# Altium schematic symbol library TitansLib.SchLib: 462 symbols (part 20 of 24)
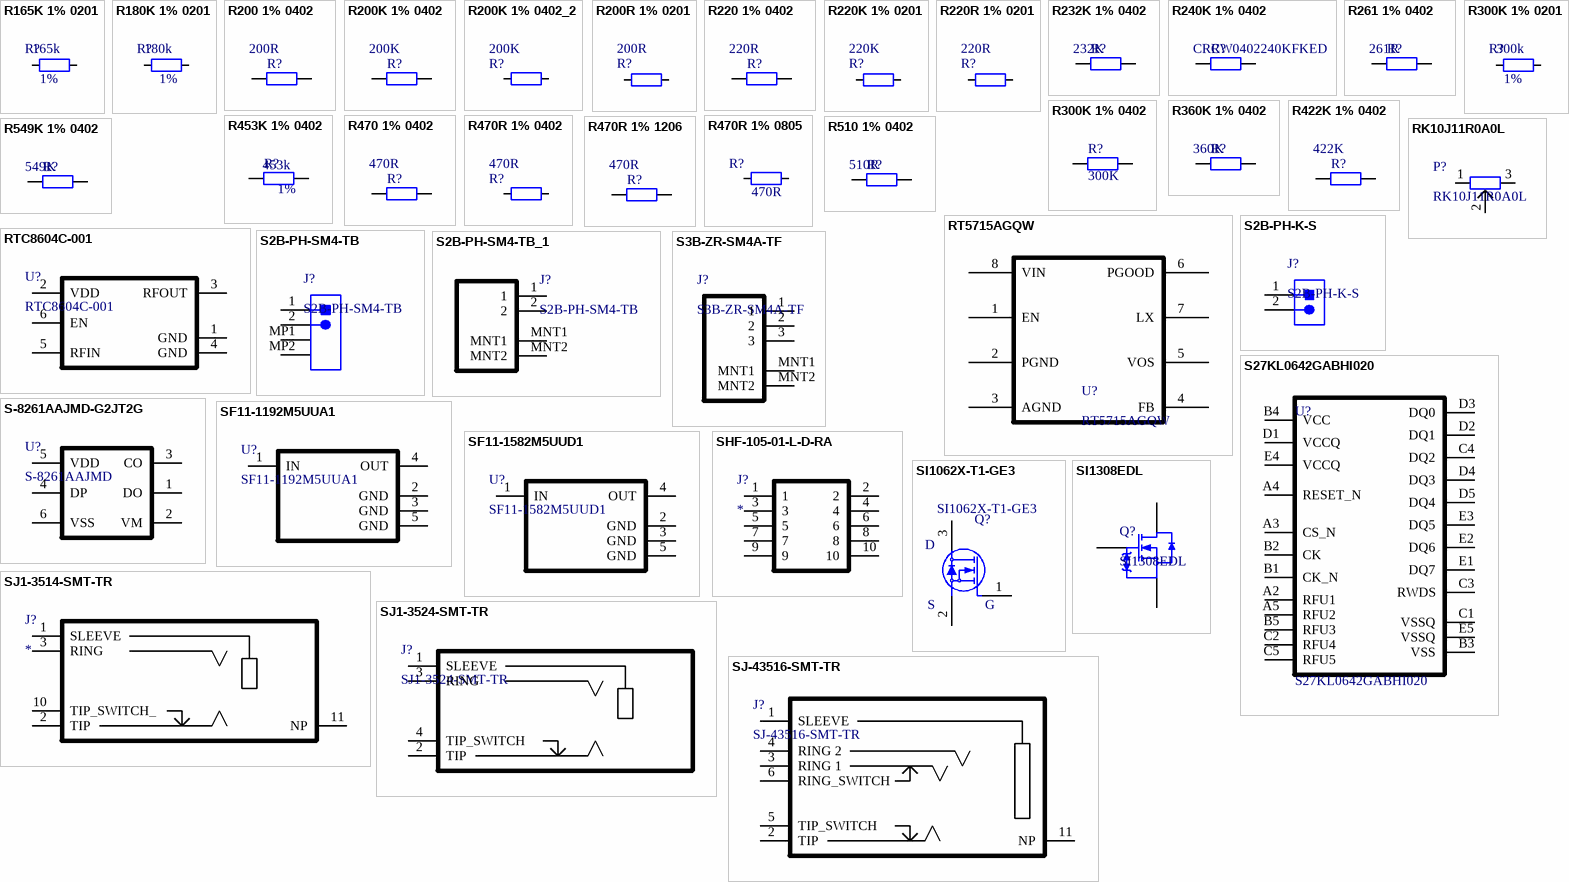
[diagram p36: symbols R165K 1% 0201 to SJ-43516-SMT-TR]

## R470 1% 0402
designator R?, comment 470R
470R 1% 0402 1/16W; Manufacturer: Yageo; Manufacturer Part Number: RC0402FR-07470RL; Additional Feature: LASER TRIMMABLE; Power: 62.5mW; Rated Temperature: 70°C; Working Voltage: 50V; Temperature Coefficient (ppm/Cel): 100; Package Height: 0.35mm; Package Length: 1mm; Package Width: 0.5mm; Supplier: Digikey; Supplier Part Number: 311-470LRCT-ND; RoHS: Yes; Category: Chip SMD Resistors; Stock: 1075453; Pricing: 1=0.1, 10=0.008, 25=0.004, 50=0.003 (USD); Mounting Technology: Surface Mount; Pins: 2; Package Shape: Rectangular; Case/Package: 0402; Terminal Finish: Nickel; Min Operating Temperature: -55°C; Max Operating Temperature: 155°C; Tolerance: 1%; JESD-609 Code: e3; Resistor Type: FIXED RESISTOR; Construction: Chip; Packaging: Tape and Reel; Technology: METAL GLAZE/THICK FILM; Termination: Wraparound; Reach SVHC Compliant: Yes; RoHS Compliant: Yes; ComponentLink1URL: https://datasheet.ciiva.com:443/pdfs/VipMasterIC/IC/YAGO/YAGO-S-A0008145938/YAGO-S-A0008145938-1.pdf?src-supplier=IHS+Markit; ComponentLink1Description: https://datasheet.ciiva.com:443/pdfs/VipMasterIC/IC/YAGO/YAGO-S-A0008145938/YAGO-S-A0008145938-1.pdf?src-supplier=IHS+Markit; ComponentLink2URL: https://datasheet.ciiva.com/2453/pyu-r-int-thick-7-2453376.pdf?src-supplier=Digikey; ComponentLink2Description: https://datasheet.ciiva.com/2453/pyu-r-int-thick-7-2453376.pdf?src-supplier=Digikey; ComponentLink3URL: https://datasheet.ciiva.com/2453/pyu-r-int-thick-7-2453377.pdf?src-supplier=Digikey; ComponentLink3Description: https://datasheet.ciiva.com/2453/pyu-r-int-thick-7-2453377.pdf?src-supplier=Digikey; ComponentLink4URL: https://datasheet.ciiva.com/2453/pyu-r-int-thick-7-2453378.pdf?src-supplier=Digikey; ComponentLink4Description: https://datasheet.ciiva.com/2453/pyu-r-int-thick-7-2453378.pdf?src-supplier=Digikey; ComponentLink5URL: https://datasheet.ciiva.com/15189/getdatasheetpartid-330246-15189463.pdf?src-supplier=Verical; ComponentLink5Description: https://datasheet.ciiva.com/15189/getdatasheetpartid-330246-15189463.pdf?src-supplier=Verical; ComponentLink6URL: https://datasheet.ciiva.com/7850/1018594-7850014.pdf?src-supplier=Element14; ComponentLink6Description: https://datasheet.ciiva.com/7850/1018594-7850014.pdf?src-supplier=Element14; ComponentLink7URL: https://datasheet.ciiva.com/7850/1018594-7850015.pdf?src-supplier=Element14; ComponentLink7Description: https://datasheet.ciiva.com/7850/1018594-7850015.pdf?src-supplier=Element14; ComponentLink8URL: https://datasheet.ciiva.com/46412/1018594-46412838.pdf?src-supplier=Element14; ComponentLink8Description: https://datasheet.ciiva.com/46412/1018594-46412838.pdf?src-supplier=Element14; Value: 470R
footprint R0402_H0P4
pins: 1, 2

## R470R 1% 0402
designator R?, comment value 470R  (hidden comment: RC0402FR-07470RL)
Res Thick Film 0402 470 Ohm 1% 0.063W(1/16W) ±100ppm/C Pad SMD T/R; Manufacturer: Yageo Group; Max Power Dissipation: 63mW; Power Dissipation: 62.5mW; Temperature Coefficient: 100ppm/°C; Voltage Rating: 50V; Supplier: DigiKey; Supplier Part Number: 311-470LRCT-ND; Manufacturer Part Number: RC0402FR-07470RL; RoHS: Compliant; Category: Chip SMD Resistors; Stock: 167633; Pricing: 1=0.1, 10=0.003 (USD); Case/Package: 0402; Case Code (Imperial): 0402; China RoHS: Non-Compliant; Composition: Thick Film; Depth: 500µm; Features: Moisture Resistant; Height: 350µm; Lead Free: Lead Free; Length: 1mm; Lifecycle Status: Production; Max Operating Temperature: 155°C; Military Standard: Not; Min Operating Temperature: -55°C; Mounting Technology: Surface Mount; Pins: 2; Number of Terminals: 2; Number of Terminations: 2; Packaging: Cut Tape; Power Rating: 63mW; REACH SVHC: Yes; Schedule B: 8533210045, 8533210045|8533210045, 8533210045|8533210045|8533210045, 8533210045|8533210045|8533210045|8533210045; Termination: SMD/SMT; Tolerance: 1%; Voltage Rating (AC): 50V; Voltage Rating (DC): 50V; Width: 500µm; Working Voltage: 50V; ComponentLink1URL: https://datasheet.octopart.com:443/RC0402FR-07470RL-Yageo-datasheet-175887523.pdf?src-supplier=IHS; ComponentLink1Description: https://datasheet.octopart.com:443/RC0402FR-07470RL-Yageo-datasheet-175887523.pdf?src-supplier=IHS; ComponentLink2URL: https://datasheet.octopart.com:443/RC0402FR-07470RL-Yageo-datasheet-62067350.pdf?src-supplier=element14+APAC; ComponentLink2Description: https://datasheet.octopart.com:443/RC0402FR-07470RL-Yageo-datasheet-62067350.pdf?src-supplier=element14+APAC; ComponentLink3URL: https://datasheet.octopart.com:443/RC0402FR-07470RL-Yageo-datasheet-10408619.pdf?src-supplier=element14+APAC; ComponentLink3Description: https://datasheet.octopart.com:443/RC0402FR-07470RL-Yageo-datasheet-10408619.pdf?src-supplier=element14+APAC; ComponentLink4URL: https://datasheet.octopart.com:443/RC0402FR-07470RL-Yageo-datasheet-103092701.pdf?src-supplier=Upverter; ComponentLink4Description: https://datasheet.octopart.com:443/RC0402FR-07470RL-Yageo-datasheet-103092701.pdf?src-supplier=Upverter; ComponentLink5URL: https://datasheet.octopart.com:443/RC0402FR-07470RL-Yageo-datasheet-68298067.pdf?src-supplier=Upverter; ComponentLink5Description: https://datasheet.octopart.com:443/RC0402FR-07470RL-Yageo-datasheet-68298067.pdf?src-supplier=Upverter; ComponentLink6URL: https://datasheet.octopart.com:443/RC0402FR-07470RL-Yageo-datasheet-8329306.pdf?src-supplier=element14; ComponentLink6Description: https://datasheet.octopart.com:443/RC0402FR-07470RL-Yageo-datasheet-8329306.pdf?src-supplier=element14; ComponentLink7URL: https://datasheet.octopart.com:443/RC0402FR-07470RL-Yageo-datasheet-8324527.pdf?src-supplier=Newark; ComponentLink7Description: https://datasheet.octopart.com:443/RC0402FR-07470RL-Yageo-datasheet-8324527.pdf?src-supplier=Newark; ComponentLink8URL: https://datasheet.octopart.com:443/RC0402FR-07470RL-Yageo-datasheet-175423674.pdf?src-supplier=SOS+electronic; ComponentLink8Description: https://datasheet.octopart.com:443/RC0402FR-07470RL-Yageo-datasheet-175423674.pdf?src-supplier=SOS+electronic; ComponentLink9URL: https://datasheet.octopart.com:443/RC0402FR-07470RL-Yageo-datasheet-164759695.pdf?src-supplier=Future+Electronics; ComponentLink9Description: https://datasheet.octopart.com:443/RC0402FR-07470RL-Yageo-datasheet-164759695.pdf?src-supplier=Future+Electronics; ComponentLink10URL: https://datasheet.octopart.com:443/RC0402FR-07470RL-Yageo-datasheet-137700087.pdf?src-supplier=Future+Electronics; ComponentLink10Description: https://datasheet.octopart.com:443/RC0402FR-07470RL-Yageo-datasheet-137700087.pdf?src-supplier=Future+Electronics; ComponentLink11URL: https://datasheet.octopart.com:443/RC0402FR-07470RL-Yageo-datasheet-12531192.pdf?src-supplier=Future+Electronics; ComponentLink11Description: https://datasheet.octopart.com:443/RC0402FR-07470RL-Yageo-datasheet-12531192.pdf?src-supplier=Future+Electronics; ComponentLink12URL: https://datasheet.octopart.com:443/RC0402FR-07470RL-Yageo-datasheet-505231.pdf?src-supplier=Future+Electronics; ComponentLink12Description: https://datasheet.octopart.com:443/RC0402FR-07470RL-Yageo-datasheet-505231.pdf?src-supplier=Future+Electronics; ComponentLink13URL: https://datasheet.octopart.com:443/RC0402FR-07470RL-Yageo-datasheet-148775077.pdf?src-supplier=TME; ComponentLink13Description: https://datasheet.octopart.com:443/RC0402FR-07470RL-Yageo-datasheet-148775077.pdf?src-supplier=TME; ComponentLink14URL: https://datasheet.octopart.com/RC0402FR-07470RL-Yageo-datasheet-73766026.pdf; ComponentLink14Description: https://datasheet.octopart.com/RC0402FR-07470RL-Yageo-datasheet-73766026.pdf; ComponentLink15URL: http://sigma.octopart.com:80/conflict_mineral_statement/Yageo-company-3.pdf?src-supplier=Compliance+Statements; ComponentLink15Description: http://sigma.octopart.com:80/conflict_mineral_statement/Yageo-company-3.pdf?src-supplier=Compliance+Statements; ComponentLink16URL: http://sigma.octopart.com:80/rohs_statement/Yageo-company-2.pdf?src-supplier=Compliance+Statements; ComponentLink16Description: http://sigma.octopart.com:80/rohs_statement/Yageo-company-2.pdf?src-supplier=Compliance+Statements; Supplier 1: DigiKey; Supplier Part Number 1: 311-470LRDKR-ND; Supplier 2: DigiKey; Supplier Part Number 2: 311-470LRCT-ND; Supplier 3: Mouser; Supplier Part Number 3: 603-RC0402FR-07470RL
footprint RES0402-M (Chip Resistor, 2-Leads, Body 1.00x0.50mm, IPC Medium Density)
pins: 1, 2

## R470R 1% 0805
designator R?, comment value 470R  (hidden comment: CRCW0805470RFKEA)
Res Thick Film 0805 470 Ohm 1% 1/8W ±100ppm/°C Molded SMD SMD Paper T/R; Manufacturer: Vishay; Manufacturer Package Identifier: CRCW0805-e3; Max Power Dissipation: 125mW; Voltage Rating: 150V; Supplier 1: DigiKey; Supplier Part Number 1: 541-470CCT-ND; Supplier 2: DigiKey; Supplier Part Number 2: 541-470CDKR-ND; Supplier 3: Mouser; Supplier Part Number 3: 71-CRCW0805-470-E3; Supplier: DigiKey; Supplier Part Number: 541-470CCT-ND; Manufacturer Part Number: CRCW0805470RFKEA; RoHS: Compliant; Category: Chip SMD Resistors; Stock: 105823; Pricing: 1=0,1, 10=0,041, 25=0,0312, 50=0,0256, 100=0,0212, 250=0,01692, 500=0,01448, 1000=0,01254 (USD); Case/Package: 0805; Case Code (Imperial): 0805; China RoHS: Non-Compliant; Composition: Thick Film; Contact Plating: Tin; Country of Origin: Israel; Depth: 1.25mm; Export Control Classification Number (ECCN) Code: EAR99; Features: Automotive AEC-Q200; Height: 450µm; Harmonized Tariff Schedule (HTS) Code: 8533.21.00.30; Introduction Date: 2005-02-16; Lead Free: Lead Free; Length: 2mm; Lifecycle Status: Production; Max Operating Temperature: 155°C; Military Standard: Not; Min Operating Temperature: -55°C; Mounting Technology: Surface Mount; Pins: 2; Number of Terminals: 2; Number of Terminations: 2; Packaging: Cut Tape; Power Dissipation: 125mW; Power Rating: 125mW; Radiation Hardening: No; REACH SVHC: Yes; Schedule B: 8533210045, 8533210045|8533210045|8533210045|8533210045|8533210045|8533210045|8533210045|8533210045|8533210045|8533210045|8533210045|8533210045|8533210045|8533210045|8533210045|8533210045|8533210045|8533210045|8533210045|8533210045|8533210045|8533210045|8533210045|85; Temperature Coefficient: 100ppm/°C; Termination: SMD/SMT; Tolerance: 1%; Voltage Rating (DC): 150V; Weight: 5.499807mg; Width: 1.25mm; Working Voltage: 150V; ComponentLink1URL: https://datasheet.octopart.com:443/CRCW0805470RFKEA-Vishay-datasheet-175423584.pdf?src-supplier=IHS; ComponentLink1Description: https://datasheet.octopart.com:443/CRCW0805470RFKEA-Vishay-datasheet-175423584.pdf?src-supplier=IHS; ComponentLink2URL: https://datasheet.octopart.com:443/CRCW0805470RFKEA-Vishay-datasheet-83961561.pdf?src-supplier=Newark; ComponentLink2Description: https://datasheet.octopart.com:443/CRCW0805470RFKEA-Vishay-datasheet-83961561.pdf?src-supplier=Newark; ComponentLink3URL: https://datasheet.octopart.com:443/CRCW0805470RFKEA-Vishay-datasheet-41302739.pdf?src-supplier=Newark; ComponentLink3Description: https://datasheet.octopart.com:443/CRCW0805470RFKEA-Vishay-datasheet-41302739.pdf?src-supplier=Newark; ComponentLink4URL: https://datasheet.octopart.com:443/CRCW0805470RFKEA-Vishay-datasheet-11516975.pdf?src-supplier=Newark; ComponentLink4Description: https://datasheet.octopart.com:443/CRCW0805470RFKEA-Vishay-datasheet-11516975.pdf?src-supplier=Newark; ComponentLink5URL: https://datasheet.octopart.com:443/CRCW0805470RFKEA-Vishay-datasheet-66077789.pdf?src-supplier=element14+APAC; ComponentLink5Description: https://datasheet.octopart.com:443/CRCW0805470RFKEA-Vishay-datasheet-66077789.pdf?src-supplier=element14+APAC; ComponentLink6URL: https://datasheet.octopart.com:443/CRCW0805470RFKEA-Vishay-datasheet-62317937.pdf?src-supplier=element14+APAC; ComponentLink6Description: https://datasheet.octopart.com:443/CRCW0805470RFKEA-Vishay-datasheet-62317937.pdf?src-supplier=element14+APAC; ComponentLink7URL: https://datasheet.octopart.com:443/CRCW0805470RFKEA-Vishay-datasheet-14722531.pdf?src-supplier=element14+APAC; ComponentLink7Description: https://datasheet.octopart.com:443/CRCW0805470RFKEA-Vishay-datasheet-14722531.pdf?src-supplier=element14+APAC; ComponentLink8URL: https://datasheet.octopart.com:443/CRCW0805470RFKEA.-Vishay-datasheet-78776209.pdf?src-supplier=element14+APAC; ComponentLink8Description: https://datasheet.octopart.com:443/CRCW0805470RFKEA.-Vishay-datasheet-78776209.pdf?src-supplier=element14+APAC; ComponentLink9URL: https://datasheet.octopart.com:443/CRCW0805470RFKEA-Vishay-datasheet-16179825.pdf?src-supplier=element14+APAC; ComponentLink9Description: https://datasheet.octopart.com:443/CRCW0805470RFKEA-Vishay-datasheet-16179825.pdf?src-supplier=element14+APAC; ComponentLink10URL: https://datasheet.octopart.com:443/CRCW0805470RFKEA-Vishay-datasheet-5300368.pdf?src-supplier=Future+Electronics; ComponentLink10Description: https://datasheet.octopart.com:443/CRCW0805470RFKEA-Vishay-datasheet-5300368.pdf?src-supplier=Future+Electronics; ComponentLink11URL: https://datasheet.octopart.com:443/CRCW0805470RFKEA-Vishay-datasheet-62316122.pdf?src-supplier=Future+Electronics; ComponentLink11Description: https://datasheet.octopart.com:443/CRCW0805470RFKEA-Vishay-datasheet-62316122.pdf?src-supplier=Future+Electronics; ComponentLink12URL: https://datasheet.octopart.com:443/CRCW0805470RFKEA-Vishay-datasheet-5306405.pdf?src-supplier=RS+(Formerly+Allied+Electronics); ComponentLink12Description: https://datasheet.octopart.com:443/CRCW0805470RFKEA-Vishay-datasheet-5306405.pdf?src-supplier=RS+(Formerly+Allied+Electronics); ComponentLink13URL: https://datasheet.octopart.com:443/CRCW0805470RFKEA-Vishay-Dale-datasheet-47688880.pdf?src-supplier=RS+(Formerly+Allied+Electronics); ComponentLink13Description: https://datasheet.octopart.com:443/CRCW0805470RFKEA-Vishay-Dale-datasheet-47688880.pdf?src-supplier=RS+(Formerly+Allied+Electronics); ComponentLink14URL: https://datasheet.octopart.com:443/CRCW0805470RFKEA-Vishay-datasheet-12001583.pdf?src-supplier=RS+(Formerly+Allied+Electronics); ComponentLink14Description: https://datasheet.octopart.com:443/CRCW0805470RFKEA-Vishay-datasheet-12001583.pdf?src-supplier=RS+(Formerly+Allied+Electronics); ComponentLink15URL: https://datasheet.octopart.com:443/CRCW0805470RFKEA-Vishay-datasheet-17834126.pdf?src-supplier=TME; ComponentLink15Description: https://datasheet.octopart.com:443/CRCW0805470RFKEA-Vishay-datasheet-17834126.pdf?src-supplier=TME; ComponentLink16URL: https://datasheet.octopart.com:443/CRCW0805470RFKEA-Vishay-datasheet-13242068.pdf?src-supplier=Farnell; ComponentLink16Description: https://datasheet.octopart.com:443/CRCW0805470RFKEA-Vishay-datasheet-13242068.pdf?src-supplier=Farnell; ComponentLink17URL: https://datasheet.octopart.com:443/CRCW0805470RFKEA-Vishay-datasheet-13195083.pdf?src-supplier=Farnell; ComponentLink17Description: https://datasheet.octopart.com:443/CRCW0805470RFKEA-Vishay-datasheet-13195083.pdf?src-supplier=Farnell; ComponentLink18URL: https://datasheet.octopart.com:443/CRCW0805470RFKEA-Vishay-datasheet-13034211.pdf?src-supplier=Farnell; ComponentLink18Description: https://datasheet.octopart.com:443/CRCW0805470RFKEA-Vishay-datasheet-13034211.pdf?src-supplier=Farnell; ComponentLink19URL: https://datasheet.octopart.com:443/CRCW0805470RFKEA-Vishay-datasheet-12600034.pdf?src-supplier=Farnell; ComponentLink19Description: https://datasheet.octopart.com:443/CRCW0805470RFKEA-Vishay-datasheet-12600034.pdf?src-supplier=Farnell; ComponentLink20URL: https://datasheet.octopart.com:443/CRCW0805470RFKEA-Vishay-datasheet-12532161.pdf?src-supplier=Farnell; ComponentLink20Description: https://datasheet.octopart.com:443/CRCW0805470RFKEA-Vishay-datasheet-12532161.pdf?src-supplier=Farnell; ComponentLink21URL: https://datasheet.octopart.com:443/CRCW0805470RFKEA-Vishay-datasheet-12517896.pdf?src-supplier=Farnell; ComponentLink21Description: https://datasheet.octopart.com:443/CRCW0805470RFKEA-Vishay-datasheet-12517896.pdf?src-supplier=Farnell; ComponentLink22URL: https://datasheet.octopart.com:443/CRCW0805470RFKEA-Vishay-datasheet-12509762.pdf?src-supplier=Farnell; ComponentLink22Description: https://datasheet.octopart.com:443/CRCW0805470RFKEA-Vishay-datasheet-12509762.pdf?src-supplier=Farnell; ComponentLink23URL: https://datasheet.octopart.com:443/CRCW0805470RFKEA-Vishay-datasheet-10322335.pdf?src-supplier=Farnell; ComponentLink23Description: https://datasheet.octopart.com:443/CRCW0805470RFKEA-Vishay-datasheet-10322335.pdf?src-supplier=Farnell; ComponentLink24URL: https://datasheet.octopart.com:443/CRCW0805470RFKEA-Vishay-datasheet-8788789.pdf?src-supplier=Farnell; ComponentLink24Description: https://datasheet.octopart.com:443/CRCW0805470RFKEA-Vishay-datasheet-8788789.pdf?src-supplier=Farnell; ComponentLink25URL: https://datasheet.octopart.com:443/CRCW0805470RFKEA-Vishay-datasheet-8361388.pdf?src-supplier=Farnell; ComponentLink25Description: https://datasheet.octopart.com:443/CRCW0805470RFKEA-Vishay-datasheet-8361388.pdf?src-supplier=Farnell; ComponentLink26URL: https://datasheet.octopart.com:443/CRCW0805470RFKEA-Vishay-datasheet-546287.pdf?src-supplier=Farnell; ComponentLink26Description: https://datasheet.octopart.com:443/CRCW0805470RFKEA-Vishay-datasheet-546287.pdf?src-supplier=Farnell; ComponentLink27URL: https://datasheet.octopart.com:443/CRCW0805470RFKEA-Vishay-datasheet-11540273.pdf?src-supplier=Arrow+Electronics; ComponentLink27Description: https://datasheet.octopart.com:443/CRCW0805470RFKEA-Vishay-datasheet-11540273.pdf?src-supplier=Arrow+Electronics; ComponentLink28URL: https://datasheet.octopart.com:443/CRCW0805470RFKEA-Vishay-datasheet-8445837.pdf?src-supplier=element14; ComponentLink28Description: https://datasheet.octopart.com:443/CRCW0805470RFKEA-Vishay-datasheet-8445837.pdf?src-supplier=element14; ComponentLink29URL: http://sigma.octopart.com:80/rohs_statement/Vishay-company-15.pdf?src-supplier=Compliance+Statements; ComponentLink29Description: http://sigma.octopart.com:80/rohs_statement/Vishay-company-15.pdf?src-supplier=Compliance+Statements
footprint RES0402-M (Chip Resistor, 2-Leads, Body 1.00x0.50mm, IPC Medium Density)
pins: 1, 2

## R470R 1% 1206
designator R?, comment value 470R  (hidden comment: RC1206JR-07470RL)
470 Ohms ±5% 0.25W, 1/4W Chip Resistor 1206 (3216 Metric) Moisture Resistant Thick Film; Manufacturer: Yageo; Supplier: Digikey; Supplier Part Number: 311-470ERCT-ND; Manufacturer Part Number: RC1206JR-07470RL; Supplier Link: https://www.digikey.com/en/products/detail/yageo/RC1206JR-07470RL/729301; Supplier Unit Price: 0.1; Datasheet: https://yageogroup.com/content/datasheet/asset/file/PYU-RC_GROUP_51_ROHS_L
footprint RCS1206_E3
pins: 1, 2

## R510 1% 0402
designator R?, comment 510R
510R 1% 0402 1/16W; Manufacturer: Yageo; Manufacturer Part Number: RC0402FR-07510RL; Additional Feature: LASER TRIMMABLE; Power: 62.5mW; Rated Temperature: 70°C; Working Voltage: 50V; Temperature Coefficient (ppm/Cel): 100; Package Height: 0.35mm; Package Length: 1mm; Package Width: 0.5mm; Supplier: Digikey; Supplier Part Number: 311-510LRCT-ND; RoHS: Yes; Category: Chip SMD Resistors; Stock: 100673; Pricing: 1=0.1, 10=0.008, 25=0.0072, 50=0.0062, 100=0.0031 (USD); Mounting Technology: Surface Mount; Pins: 2; Package Shape: Rectangular; Case/Package: 0402; Terminal Finish: Nickel; Min Operating Temperature: -55°C; Max Operating Temperature: 155°C; Tolerance: 1%; JESD-609 Code: e3; Resistor Type: FIXED RESISTOR; Construction: Chip; Packaging: Tape and Reel; Value: 510R; Technology: METAL GLAZE/THICK FILM; Termination: Wraparound; Reach SVHC Compliant: Yes; RoHS Compliant: Yes; ComponentLink1URL: https://datasheet.ciiva.com:443/pdfs/VipMasterIC/IC/YAGO/YAGO-S-A0008145938/YAGO-S-A0008145938-1.pdf?src-supplier=IHS+Markit; ComponentLink1Description: https://datasheet.ciiva.com:443/pdfs/VipMasterIC/IC/YAGO/YAGO-S-A0008145938/YAGO-S-A0008145938-1.pdf?src-supplier=IHS+Markit; ComponentLink2URL: https://datasheet.ciiva.com/2453/pyu-r-int-thick-7-2453397.pdf?src-supplier=Digikey; ComponentLink2Description: https://datasheet.ciiva.com/2453/pyu-r-int-thick-7-2453397.pdf?src-supplier=Digikey; ComponentLink3URL: https://datasheet.ciiva.com/2453/pyu-r-int-thick-7-2453398.pdf?src-supplier=Digikey; ComponentLink3Description: https://datasheet.ciiva.com/2453/pyu-r-int-thick-7-2453398.pdf?src-supplier=Digikey; ComponentLink4URL: https://datasheet.ciiva.com/2453/pyu-r-int-thick-7-2453399.pdf?src-supplier=Digikey; ComponentLink4Description: https://datasheet.ciiva.com/2453/pyu-r-int-thick-7-2453399.pdf?src-supplier=Digikey; ComponentLink5URL: https://datasheet.ciiva.com/17063/pyu-rc0402-51-rohs-l-6-r-17063430.pdf?src-supplier=Future+Electronics; ComponentLink5Description: https://datasheet.ciiva.com/17063/pyu-rc0402-51-rohs-l-6-r-17063430.pdf?src-supplier=Future+Electronics
footprint R0402_H0P4
pins: 1, 2

## R549K 1% 0402
designator R?, comment 549K
Fixed Resistor, Metal Glaze/thick Film, 0.0625W, 549000ohm, 50V, 1% +/-Tol, 100ppm/Cel, Surface Mount, 0402; Manufacturer: Yageo; Manufacturer Part Number: RC0402FR-07549KL; Additional Feature: LASER TRIMMABLE; Power: 62.5mW; Rated Temperature: 70°C; Temperature Coefficient (ppm/Cel): 100; Package Height: 0.35mm; Package Length: 1mm; Package Width: 0.5mm; Supplier: Digikey; Supplier Part Number: YAG3184CT-ND; RoHS: Yes; Category: Chip SMD Resistors; Stock: 12074; Pricing: 1=0.1, 10=0.007, 25=0.0068, 50=0.0062, 100=0.0031 (USD); Mounting Technology: Surface Mount; Pins: 2; Package Shape: Rectangular; Case/Package: 0402; Terminal Finish: Nickel; Min Operating Temperature: -55°C; Max Operating Temperature: 155°C; Tolerance: 1%; JESD-609 Code: e3; Resistor Type: FIXED RESISTOR; Construction: Chip; Packaging: Tape and Reel; Value: 549K; Technology: METAL GLAZE/THICK FILM; Termination: Wraparound; Working Voltage: 50V; Reach SVHC Compliant: Yes; RoHS Compliant: Yes; ComponentLink1URL: https://datasheet.ciiva.com:443/pdfs/VipMasterIC/IC/YAGO/YAGO-S-A0008145938/YAGO-S-A0008145938-1.pdf?src-supplier=IHS+Markit; ComponentLink1Description: https://datasheet.ciiva.com:443/pdfs/VipMasterIC/IC/YAGO/YAGO-S-A0008145938/YAGO-S-A0008145938-1.pdf?src-supplier=IHS+Markit; ComponentLink2URL: https://datasheet.ciiva.com/17419/pyu-rc0402-51-rohs-l-6-r-17419561.pdf?src-supplier=Future+Electronics; ComponentLink2Description: https://datasheet.ciiva.com/17419/pyu-rc0402-51-rohs-l-6-r-17419561.pdf?src-supplier=Future+Electronics
footprint R0402_H0P4
pins: 1, 2

## RK10J11R0A0L
designator P?
With Knob Type RK10J Series; Manufacturer: Alps Alpine; Supplier: Mouser; Supplier Part Number: 688-RK10J11R0A0L; Manufacturer Part Number: RK10J11R0A0L; RoHS: Yes; Category: Potentiometer; Stock: 1498; Pricing: 1=2.87, 10=2.42, 100=2.03, 500=1.76,1 1000=1.44 (USD); Resistor Type: Variable; Reach SVHC Compliant: Yes; RoHS Compliant: Yes; ComponentLink1URL: https://www.mouser.com/ProductDetail/CTS-Electronic-Components/06TR4FA104DPR?qs=dbcCsuKDzFX9WkkidUqJ3g%3D%3D&srsltid=AfmBOop_COOrXBpqK8YDp2e4mr-jayDMNgkXQMHWR55lB1NNJLdGUN-R; ComponentLink1Description: https://datasheet.ciiva.com:443/pdfs/VipMasterIC/IC/SGST/SGST-S-A0006719383/SGST-S-A0006719383-1.pdf?src-supplier=IHS+Markit; ComponentLink2Description: http://www.st.com/resource/en/datasheet/esdavlc6-2bly.pdf?src-supplier=Digikey; Supplier 1: DigiKey; Supplier Part Number 1: 4809-RK10J11R0A0LCT-ND; Supplier 2: DigiKey; Supplier Part Number 2: 4809-RK10J11R0A0LDKR-ND; Supplier 3: Mouser; Supplier Part Number 3: 688-RK10J11R0A0L
footprint RK10J11R0A0L
pins: 1, 2 (power), 3

## RT5715AGQW
designator U?
5.5VIN, 2A, High Efficiency Synchronous Step-Down Converter / with Low Quiescent Current
footprint RT5715AGQW (PSON, 8-Leads, Body 951,05x2,00mm, Pitch 0,50mm, Thermal Pad 1,20x0,80mm, IPC High Density)
pins: 1 EN, 2 PGND (power), 3 AGND (power), 4 FB, 5 VOS, 6 PGOOD, 7 LX, 8 VIN (power)

## RTC8604C-001
designator U?
pins: 1 GND, 2 VDD, 3 RFOUT, 4 GND, 5 RFIN, 6 EN

## S2B-PH-K-S
designator J?
Conn Shrouded Header (4 Sides) HDR 2 POS 2mm Solder RA Side Entry Thru-Hole Box; Manufacturer: JST; Manufacturer Part Number: S2B-PH-K-S(LF)(SN); Value: 10µF; Connector Type: Male Pin; Contact Resistance: 20mΩ; Current Rating: 2A; Gender: Male; Insulation Resistance: 1GΩ; Max Voltage Rating (AC): 100V; Number of Contacts: 2; Tolerance: 20%; Voltage Rating: 50V; Supplier: LCSC; Supplier Part Number: C173752; RoHS: Compliant; Category: Headers and Wire Housings; Stock: 45740; Pricing: 20=0.253, 20=0.0301, 20=0.2762, 20=0.0346, 200=0.1981, 200=0.0236, 200=0.2163, 200=0.0271, 1000=0.1674, 1000=0.02, 1000=0.1828, 1000=0.0229, 2000=0.1492, 2000=0.0178, 2000=0.1628, 2000=0.0204, 10000=0.1338, 10000=0.016, 10000=0.1461, 10000=0.0183, 20000=0.125, 20000=0.0149, 20000=0.1365, 20000=0.0171 (CNY); Case/Package: Radial; China RoHS: Compliant; Color: Natural, White; Contact Gender: Male; Contact Material: Brass; Contact Mating Length: 3.302mm; Contact Plating: Tin; Depth: 7.6mm; Diameter: 5mm; Fastening Type: Detent; Flammability Rating: UL94 V-0; Height: 11mm; Lead Free: Lead Free; Lead Pitch: 2mm; Length: 11mm; Lifecycle Status: Production; Max Current Rating: 2A; Max Operating Temperature: 85°C; Max Voltage Rating (DC): 100V; Min Operating Temperature: -25°C; Mounting Technology: Through Hole; Pins: 2; Number of Poles: 2; Number of Positions: 2; Number of Rows: 1; Orientation: Right Angle; Packaging: Bulk; Pitch: 2mm; Radiation Hardening: No; REACH SVHC: Yes; Terminal Pitch: 2mm; Termination: Solder; Voltage Rating (AC): 100V; Voltage Rating (DC): 50V; Weight: 28.349523g; Width: 4.5mm; Working Voltage: 100V; ComponentLink1URL: https://datasheet.octopart.com:443/S2B-PH-K-S%28LF%29%28SN%29-JST-datasheet-180491669.pdf?src-supplier=IHS; ComponentLink1Description: https://datasheet.octopart.com:443/S2B-PH-K-S%28LF%29%28SN%29-JST-datasheet-180491669.pdf?src-supplier=IHS; ComponentLink2URL: https://datasheet.octopart.com:443/S2B-PH-K-S%28LF%29%28SN%29-JST-datasheet-10411123.pdf?src-supplier=Upverter; ComponentLink2Description: https://datasheet.octopart.com:443/S2B-PH-K-S%28LF%29%28SN%29-JST-datasheet-10411123.pdf?src-supplier=Upverter; ComponentLink3URL: https://datasheet.octopart.com:443/S2B-PH-K-S%28LF%29%28SN%29-JST-datasheet-8324864.pdf?src-supplier=Upverter; ComponentLink3Description: https://datasheet.octopart.com:443/S2B-PH-K-S%28LF%29%28SN%29-JST-datasheet-8324864.pdf?src-supplier=Upverter; ComponentLink4URL: https://datasheet.octopart.com:443/S2B-PH-K-S%28LF%29%28SN%29-JST-datasheet-56537.pdf?src-supplier=Upverter; ComponentLink4Description: https://datasheet.octopart.com:443/S2B-PH-K-S%28LF%29%28SN%29-JST-datasheet-56537.pdf?src-supplier=Upverter; ComponentLink5URL: https://datasheet.octopart.com:443/S2B-PH-K-S%28LF%29%28SN%29-JST-datasheet-15068535.pdf?src-supplier=Upverter; ComponentLink5Description: https://datasheet.octopart.com:443/S2B-PH-K-S%28LF%29%28SN%29-JST-datasheet-15068535.pdf?src-supplier=Upverter; ComponentLink6URL: https://datasheet.octopart.com:443/S2B-PH-K-S%28LF%29%28SN%29-JST-datasheet-147762421.pdf?src-supplier=LKR; ComponentLink6Description: https://datasheet.octopart.com:443/S2B-PH-K-S%28LF%29%28SN%29-JST-datasheet-147762421.pdf?src-supplier=LKR; ComponentLink7URL: https://datasheet.octopart.com:443/S2B-PH-K-S%28LF%29%28SN%29-JST-datasheet-12510261.pdf?src-supplier=Future+Electronics; ComponentLink7Description: https://datasheet.octopart.com:443/S2B-PH-K-S%28LF%29%28SN%29-JST-datasheet-12510261.pdf?src-supplier=Future+Electronics; Supplier 1: LCSC; Supplier Part Number 1: C173752; Supplier 2: Mouser; Supplier Part Number 2: 306-S2BPHKSLFSNPP
footprint JST-S2B-PH-K-S_V (THD, 2-Leads, Body 7.6x5.9mm, Pitch 2mm)
pins: 1, 2

## S2B-PH-SM4-TB
designator J?
Male Header, Pitch 2 mm, 1 x 2 Position, Height 5.5 mm, -25 to 85 degC, RoHS, Tape and Reel; Manufacturer: JST; Manufacturer Part Number: S2B-PH-SM4-K-TB(LF)(SN); Supplier: Mouser; Supplier Part Number: 306-S2BPHSM4KTBLFSN; RoHS: No; Category: LDO
footprint JST- S2B-PH-SM4-TB (SMD, 2-Leads, Body 7.9x7.6mm, Pitch 2mm)
pins: 1, 2, MP1, MP2

## S2B-PH-SM4-TB_1
designator J?, comment S2B-PH-SM4-TB
Board Connector, 2 Contact(s), 1 Row(s), Male, Right Angle, Surface Mount Terminal; Manufacturer: JST; Contact Resistance: 20mΩ; Current Rating: 2A; Dielectric Material: Polyamide; Insulation Resistance: 1GΩ; Number of Poles: 2; Pitch: 2mm; Supplier: DigiKey; Supplier Part Number: 455-S2B-PH-SM4-TBCT-ND; Manufacturer Part Number: S2B-PH-SM4-TB; RoHS: Compliant; Category: Card Edge Connectors; Stock: 79659; Pricing: 1=0.48, 10=0.409, 100=0.3477, 500=0.31032 (USD); Case/Package: SMD/SMT; Contact Gender: Male; Contact Plating: Tin; Height: 5.5mm; Length: 7.9mm; Lifecycle Status: Obsolete; Max Operating Temperature: 85°C; Min Operating Temperature: -25°C; Pins: 2; Number of Rows: 1; Orientation: Horizontal; Terminal Pitch: 2mm; Width: 7.6mm; ComponentLink1URL: https://datasheet.octopart.com:443/S2B-PH-SM4-TB-JST-datasheet-15068535.pdf?src-supplier=IHS; ComponentLink1Description: https://datasheet.octopart.com:443/S2B-PH-SM4-TB-JST-datasheet-15068535.pdf?src-supplier=IHS; ComponentLink2URL: https://datasheet.octopart.com:443/S2B-PH-SM4-TB-JST-datasheet-12510261.pdf?src-supplier=TME; ComponentLink2Description: https://datasheet.octopart.com:443/S2B-PH-SM4-TB-JST-datasheet-12510261.pdf?src-supplier=TME; Supplier 1: DigiKey; Supplier Part Number 1: 455-S2B-PH-SM4-TBCT-ND; Supplier 2: DigiKey; Supplier Part Number 2: 455-S2B-PH-SM4-TBTR-ND
footprint S2B-PH-SM4-TB
pins: 1, 2, MNT1, MNT2

## S3B-ZR-SM4A-TF
designator J?
Wire-To-Board Connector, Side Entry, Zh Series, Surface Mount, Header, 3, 1.5 Mm Rohs Compliant: Yes; Manufacturer: JST; Contact Resistance: 20mΩ; Current Rating: 1A; Gender: Male; Insulation Resistance: 500MΩ; Number of Contacts: 3; Supplier: DigiKey; Supplier Part Number: 455-S3B-ZR-SM4A-TFCT-ND; Manufacturer Part Number: S3B-ZR-SM4A-TF; RoHS: Compliant; Category: Card Edge Connectors; Stock: 3901; Pricing: 1=0.54, 10=0.457, 100=0.3885, 500=0.34674 (USD); Contact Gender: Male; Contact Material: Brass; Contact Plating: Tin; Lifecycle Status: Obsolete; Max Operating Temperature: 85°C; Min Operating Temperature: -25°C; Mounting Technology: Surface Mount; Pins: 3; Number of Rows: 1; Orientation: Horizontal; Packaging: Cut Tape; REACH SVHC: No; Terminal Pitch: 1.5mm; Termination: SMD/SMT; ComponentLink1URL: https://datasheet.octopart.com:443/S3B-ZR-SM4A-TF-JST-datasheet-15994737.pdf?src-supplier=IHS; ComponentLink1Description: https://datasheet.octopart.com:443/S3B-ZR-SM4A-TF-JST-datasheet-15994737.pdf?src-supplier=IHS; ComponentLink2URL: https://datasheet.octopart.com:443/S3B-ZR-SM4A-TF-JST-datasheet-86447860.pdf?src-supplier=IHS; ComponentLink2Description: https://datasheet.octopart.com:443/S3B-ZR-SM4A-TF-JST-datasheet-86447860.pdf?src-supplier=IHS; ComponentLink3URL: https://datasheet.octopart.com:443/S3B-ZR-SM4A-TF-JST-datasheet-11037208.pdf?src-supplier=element14+APAC; ComponentLink3Description: https://datasheet.octopart.com:443/S3B-ZR-SM4A-TF-JST-datasheet-11037208.pdf?src-supplier=element14+APAC; ComponentLink4URL: https://datasheet.octopart.com:443/S3B-ZR-SM4A-TF-JST-datasheet-8328021.pdf?src-supplier=element14+APAC; ComponentLink4Description: https://datasheet.octopart.com:443/S3B-ZR-SM4A-TF-JST-datasheet-8328021.pdf?src-supplier=element14+APAC; ComponentLink5URL: https://datasheet.octopart.com:443/S3B-ZR-SM4A-TF-JST-datasheet-12514103.pdf?src-supplier=TME; ComponentLink5Description: https://datasheet.octopart.com:443/S3B-ZR-SM4A-TF-JST-datasheet-12514103.pdf?src-supplier=TME
footprint S3B-PH-SM4-TB
pins: 1, 2, 3, MNT1, MNT2

## S27KL0642GABHI020
designator U?
64Mb HYPERRAM self-refresh DRAM; Manufacturer: Infineon Technologies; Manufacturer Order Number: S27KL0642GABHI020; PackageReference: PG-BGA-24-803
footprint S27KL0642GABHI020 (BGA,1.00mm pitch,rect.;24 pin,5 columns X 5 rows,6.00mm X 8.00mm X 1.00mm H)
pins: A2 RFU1 "Reserved for Future Use", A3 CS_N, A4 RESET_N, A5 RFU2 "Reserved for Future Use", B1 CK_N, B2 CK, B3 VSS (power) "Array Ground", B4 VCC (power) "Array Power", B5 RFU3 "Reserved for Future Use", C1 VSSQ (power) "Input/Output Ground", C2 RFU4 "Reserved for Future Use", C3 RWDS "Read-Write Data Strobe", C4 DQ2 "Data Input/Output", C5 RFU5 "Reserved for Future Use", D1 VCCQ (power) "Input/Output Power", D2 DQ1 "Data Input/Output", D3 DQ0 "Data Input/Output", D4 DQ3 "Data Input/Output", D5 DQ4 "Data Input/Output", E1 DQ7 "Data Input/Output", E2 DQ6 "Data Input/Output", E3 DQ5 "Data Input/Output", E4 VCCQ (power) "Input/Output Power", E5 VSSQ (power) "Input/Output Ground"

## S-8261AAJMD-G2JT2G
designator U?, comment S-8261AAJMD
Power Supply Support Circuit, Fixed, 1 Channel, CMOS, PDSO6; Manufacturer: ABLIC; Manufacturer Part Number: S-8261AAJMD-G2JT2G; Package Body Material: Plastic; Adjustable Threshold: No; Number of Channels: 1; Max Supply Voltage: 8V; Min Supply Voltage: 1.5V; Nominal Supply Voltage: 1.8V; Time @ Peak Reflow Temperature-Max (s): 10s; Qualification Status: Not Qualified; Supplier: Digikey; Supplier Part Number: 1662-S-8261AAJMD-G2JT2GCT-ND; RoHS: Yes; Category: Battery Management; Stock: 2725; Pricing: 1=0.94, 10=0.675, 25=0.6084, 100=0.5353, 250=0.50048, 500=0.47948, 1000=0.46219 (USD); Case/Package: LSSOP; Pins: 6; Package Shape: Rectangular; Min Operating Temperature: -40°C; Max Operating Temperature: 85°C; Throw Configuration: POWER SUPPLY SUPPORT CIRCUIT; JESD-30 Code: R-PDSO-G6; Channels: 1; Package Style: SMALL OUTLINE, LOW PROFILE, SHRINK PITCHMeter; Peak Reflow Temperature (Cel): 260°C; Surface Mount: Yes; Technology: CMOS; Terminal Form: Gull Wing; Terminal Position: DUAL; Length: 2.9mm; Width: 1.6mm; Height - Seated (Max): 1.35mm; Terminal Pitch: 0.95mm; Temperature Grade: INDUSTRIAL; Reach SVHC Compliant: Yes; RoHS Compliant: Yes; ComponentLink1URL: https://datasheet.ciiva.com:443/pdfs/VipMasterIC/IC/ABLI/ABLI-S-A0008593318/ABLI-S-A0008593318-1.pdf?src-supplier=IHS+Markit; ComponentLink1Description: https://datasheet.ciiva.com:443/pdfs/VipMasterIC/IC/ABLI/ABLI-S-A0008593318/ABLI-S-A0008593318-1.pdf?src-supplier=IHS+Markit; ComponentLink2URL: http://datasheet.sii-ic.com/en/battery_protection/S8261_E.pdf?src-supplier=Digikey; ComponentLink2Description: http://datasheet.sii-ic.com/en/battery_protection/S8261_E.pdf?src-supplier=Digikey; ComponentLink3URL: https://datasheet.octopart.com/S-8261AAJMD-G2JT2G-ABLIC-datasheet-154723846.pdf?src-supplier=Master+Electronics; ComponentLink3Description: https://datasheet.octopart.com/S-8261AAJMD-G2JT2G-ABLIC-datasheet-154723846.pdf?src-supplier=Master+Electronics
footprint SOT95P275X120-6N (SOT23, 6-Leads, Body 2.90x2.75mm, Pitch 0.95mm, IPC Medium Density)
pins: 1 DO, 2 VM, 3 CO, 4 DP, 5 VDD, 6 VSS

## SF11-1192M5UUA1
designator U?
Filter Saw 1.176GHZ 5-SMD; Manufacturer: KYOCERA AVX; Supplier: DigiKey; Supplier Part Number: 478-SF11-1192M5UUA1CT-ND; Manufacturer Part Number: SF11-1192M5UUA1; RoHS: Compliant; Category: SAW Filters; Stock: 5690; Pricing: 1=0.45, 10=0.362, 25=0.334, 50=0.314, 100=0.2953, 250=0.27232, 500=0.25616, 1000=0.24095 (USD); Introduction Date: 2025-01-19; Lifecycle Status: Production; REACH SVHC: Yes
footprint SF11-1192M5UUA1
pins: 1 IN, 2 GND, 3 GND, 4 OUT, 5 GND

## SF11-1582M5UUD1
designator U?
Filter Saw 1.602GHZ 5-SMD; Manufacturer: KYOCERA AVX; Supplier: DigiKey; Supplier Part Number: 478-SF11-1582M5UUD1CT-ND; Manufacturer Part Number: SF11-1582M5UUD1; RoHS: Compliant; Category: SAW Filters; Stock: 5995; Pricing: 1=0.71, 10=0.579, 25=0.5336, 50=0.5018, 100=0.4719, 250=0.4352, 500=0.40938, 1000=0.38509 (USD); Lifecycle Status: Production; REACH SVHC: Yes
footprint SF11-1582M5UUD1
pins: 1 IN, 2 GND, 3 GND, 4 OUT, 5 GND

## SHF-105-01-L-D-RA
designator J?
Connector Header Through Hole, Right Angle 10 position 0.050" (1.27mm); Manufacturer 1: SAMTEC; Manufacturer Part Number 1: SHF-105-01-L-D-RA; Datasheet Link: http://suddendocs.samtec.com/catalog_english/shf.pdf; Height: 5.33mm; Supplier Part Number 1: 200-SHF10501LDRATR; Supplier Link 1: https://www.mouser.co.uk/ProductDetail/Samtec/SHF-105-01-L-D-RA-TR?qs=%252BZP6%2F%252BtExtA3jdVUpsGHlg%3D%3D; Supplier Unit Price 1: 2.62; Supplier 1: Mouser
footprint SHF10501LDRA
pins: 1, 2, 3, 4, 5, 6, 7, 8, 9, 10

## SI1062X-T1-GE3
designator Q?
SI1062X-T1-GE3 N-channel Mosfet Transistor, 0.53 A, 20 V, 3-PIN SC-89; Manufacturer: Vishay; Continuous Drain Current (ID): 530mA; Drain to Source Breakdown Voltage: 20V; Drain to Source Resistance: 420mΩ; Element Configuration: Single; Fall Time: 11ns; Gate to Source Voltage (Vgs): 8V; Input Capacitance: 43pF; Max Junction Temperature (Tj): 150°C; Max Power Dissipation: 220mW; Number of Channels: 1; Value: 420mΩ; Rise Time: 14ns; Threshold Voltage: 1V; Turn-Off Delay Time: 16ns; Turn-On Delay Time: 2ns; ComponentLink1URL: http://tunmcdsvn.tun.st.com/Component_Documentation_Library/Trunk/Transistor/VISHAY_SI1062X; Supplier: DigiKey; Supplier Part Number: SI1062X-T1-GE3CT-ND; Manufacturer Part Number: SI1062X-T1-GE3; RoHS: Compliant; Category: MOSFETs; Stock: 83287; Pricing: 1=0.37, 10=0.228, 100=0.143, 500=0.10622, 1000=0.09431 (USD); Case/Package: SC; China RoHS: Compliant; Drain to Source Voltage (Vdss): 20V; Height: 800µm; Lead Free: Lead Free; Lifecycle Status: Production; Max Operating Temperature: 150°C; Min Breakdown Voltage: 20V; Min Operating Temperature: -55°C; Mounting Technology: Surface Mount; Number of Elements: 1; Pins: 3; Number of Terminals: 3; Power Dissipation: 220mW; Rds On Max: 420mΩ; REACH SVHC: Yes; Schedule B: 8541210080, 8541210080|8541210080|8541210080|8541210080|8541210080; Weight: 29.993795mg; ComponentLink2URL: https://datasheet.octopart.com:443/SI1062X-T1-GE3-Vishay-Siliconix-datasheet-167194862.pdf?src-supplier=Upverter; ComponentLink2Description: https://datasheet.octopart.com:443/SI1062X-T1-GE3-Vishay-Siliconix-datasheet-167194862.pdf?src-supplier=Upverter; ComponentLink3URL: https://sigma.octopart.com:443/167194865/technical_drawing/Vishay-Siliconix-SI1062X-T1-GE3.pdf?src-supplier=Upverter; ComponentLink3Description: https://sigma.octopart.com:443/167194865/technical_drawing/Vishay-Siliconix-SI1062X-T1-GE3.pdf?src-supplier=Upverter; ComponentLink4URL: https://datasheet.octopart.com:443/SI1062X-T1-GE3-Vishay-datasheet-181471016.pdf?src-supplier=Newark; ComponentLink4Description: https://datasheet.octopart.com:443/SI1062X-T1-GE3-Vishay-datasheet-181471016.pdf?src-supplier=Newark; ComponentLink5URL: https://datasheet.octopart.com:443/SI1062X-T1-GE3-Vishay-datasheet-67357206.pdf?src-supplier=element14+APAC; ComponentLink5Description: https://datasheet.octopart.com:443/SI1062X-T1-GE3-Vishay-datasheet-67357206.pdf?src-supplier=element14+APAC; ComponentLink6URL: https://datasheet.octopart.com:443/SI1062X-T1-GE3-Vishay-Siliconix-datasheet-62309509.pdf?src-supplier=RS+(Formerly+Allied+Electronics); ComponentLink6Description: https://datasheet.octopart.com:443/SI1062X-T1-GE3-Vishay-Siliconix-datasheet-62309509.pdf?src-supplier=RS+(Formerly+Allied+Electronics); ComponentLink7URL: https://datasheet.octopart.com:443/SI1062X-T1-GE3-Vishay-datasheet-17268857.pdf?src-supplier=Future+Electronics; ComponentLink7Description: https://datasheet.octopart.com:443/SI1062X-T1-GE3-Vishay-datasheet-17268857.pdf?src-supplier=Future+Electronics; ComponentLink8URL: http://sigma.octopart.com:80/rohs_statement/Vishay-company-15.pdf?src-supplier=Compliance+Statements; ComponentLink8Description: http://sigma.octopart.com:80/rohs_statement/Vishay-company-15.pdf?src-supplier=Compliance+Statements; Supplier 1: DigiKey; Supplier Part Number 1: SI1062X-T1-GE3CT-ND; Supplier 2: DigiKey; Supplier Part Number 2: SI1062X-T1-GE3TR-ND; Supplier 3: Mouser; Supplier Part Number 3: 78-SI1062X-T1-GE3
footprint MOS_SC89-3L
pins: 1 G, 2 S, 3 D

## SI1308EDL
designator Q?
Small Signal Field-Effect Transistor, 1.4A I(D), 30V, 1-Element, N-Channel, Silicon, Metal-oxide Semiconductor FET; Manufacturer: Vishay Siliconix; Manufacturer Part Number: SI1308EDL-T1-GE3; Package Body Material: Plastic; Drain-source On Resistance-Max: 132mR; Number of Elements: 1; Operating Mode: ENHANCEMENT MODE; Power Dissipation-Max (Abs): 500mW; Transistor Application: SWITCHING; Supplier: Mouser; Supplier Part Number: 78-SI1308EDL-T1-GE3; RoHS: Yes; Category: MOSFETs; Stock: 29517; Pricing: 1=0.45, 10=0.309, 50=0.309, 100=0.18, 1000=0.155, 10000=0.093 (USD); Pins: 3; Package Shape: Rectangular; Terminal Finish: Tin; Transistor Element Material: SILICON; Max Operating Temperature: 150°C; JESD-609 Code: e3; Polarity/Channel Type: N-CHANNEL; Drain Current-Max (Abs) (ID): 1.4A; Drain Current-Max (ID): 1.4A; DS Breakdown Voltage-Min: 30V; FET Technology: METAL-OXIDE SEMICONDUCTOR; JESD-30 Code: R-PDSO-G3; Moisture Sensitivity Level: 1; Package Style: SMALL OUTLINEMeter; Surface Mount: Yes; Terminal Form: Gull Wing; Terminal Position: DUAL; Reach SVHC Compliant: Yes; RoHS Compliant: Yes; ComponentLink1URL: https://datasheet.ciiva.com:443/pdfs/VipMasterIC/IC/VISH/VISH-S-A0000692786/VISH-S-A0000692786-1.pdf?src-supplier=IHS+Markit; ComponentLink1Description: https://datasheet.ciiva.com:443/pdfs/VipMasterIC/IC/VISH/VISH-S-A0000692786/VISH-S-A0000692786-1.pdf?src-supplier=IHS+Markit; ComponentLink2URL: https://datasheet.ciiva.com/24019/si1308edl-256534-24019968.pdf?src-supplier=Mouser; ComponentLink2Description: https://datasheet.ciiva.com/24019/si1308edl-256534-24019968.pdf?src-supplier=Mouser; ComponentLink3URL: https://datasheet.ciiva.com/30479/0900766b8126ce45-30479740.pdf?src-supplier=Rs; ComponentLink3Description: https://datasheet.ciiva.com/30479/0900766b8126ce45-30479740.pdf?src-supplier=Rs; ComponentLink4URL: https://datasheet.ciiva.com/16486/si1308edl-16486134.pdf?src-supplier=Future+Electronics; ComponentLink4Description: https://datasheet.ciiva.com/16486/si1308edl-16486134.pdf?src-supplier=Future+Electronics; ComponentLink5URL: https://datasheet.ciiva.com/7788/si1308edl-7788743.pdf?src-supplier=Element14; ComponentLink5Description: https://datasheet.ciiva.com/7788/si1308edl-7788743.pdf?src-supplier=Element14; Supplier 1: Mouser; Supplier Part Number 1: 78-SI1308EDL-T1-GE3; Supplier 2: Digikey; Supplier Part Number 2: SI1308EDL-T1-GE3CT-ND
footprint SI1308EDL
pins: 1 G, 2 S, 3 D

## SJ1-3514-SMT-TR
designator J?
Phone Connectors Audio Jacks 3.5mm; Manufacturer_Name: Same Sky; Manufacturer_Part_Number: SJ1-3514-SMT-TR; Datasheet Link: https://www.sameskydevices.com/product/resource/sj1-351x-smt.pdf; Height: 5mm; Mouser Part Number: 490-SJ1-3514-SMT-TR; Mouser Price/Stock: https://www.mouser.co.uk/ProductDetail/CUI-Devices/SJ1-3514-SMT-TR?qs=WyjlAZoYn50gZGh%2FEwMauw%3D%3D; Arrow Part Number: SJ1-3514-SMT-TR; Arrow Price/Stock: https://www.arrow.com/en/products/sj1-3514-smt-tr/cui-devices?region=nac
footprint SJ13514SMTTR
pins: 1 SLEEVE, 2 TIP, 3 RING, 10 TIP_SWITCH_, 11 NP

## SJ1-3524-SMT-TR
designator J?
Phone Connectors Audio Jacks 3.5mm; Manufacturer_Name: Same Sky; Manufacturer Part Number: SJ1-3514-SMT-TR; Datasheet Link: https://www.sameskydevices.com/product/resource/sj1-351x-smt.pdf; Height: 5mm; Mouser Part Number: 490-SJ1-3514-SMT-TR; Mouser Price/Stock: https://www.mouser.co.uk/ProductDetail/CUI-Devices/SJ1-3514-SMT-TR?qs=WyjlAZoYn50gZGh%2FEwMauw%3D%3D; Arrow Part Number: SJ1-3514-SMT-TR; Arrow Price/Stock: https://www.arrow.com/en/products/sj1-3514-smt-tr/cui-devices?region=nac
footprint SJ3524SMTTR
pins: 1 SLEEVE, 2 TIP, 3 RING, 4 TIP_SWITCH

## SJ-43516-SMT-TR
designator J?
Supplier 1: DigiKey; Supplier Part Number 1: CP-43516SJCT-ND; Supplier 2: DigiKey; Supplier Part Number 2: CP-43516SJDKR-ND; Supplier 3: Mouser; Supplier Part Number 3: 490-SJ-43516-SMT-TR
footprint SJ-43516-SMT-TR
pins: 1 SLEEVE, 2 TIP, 3 RING 1, 4 RING 2, 5 TIP_SWITCH, 6 RING_SWITCH, 11 NP

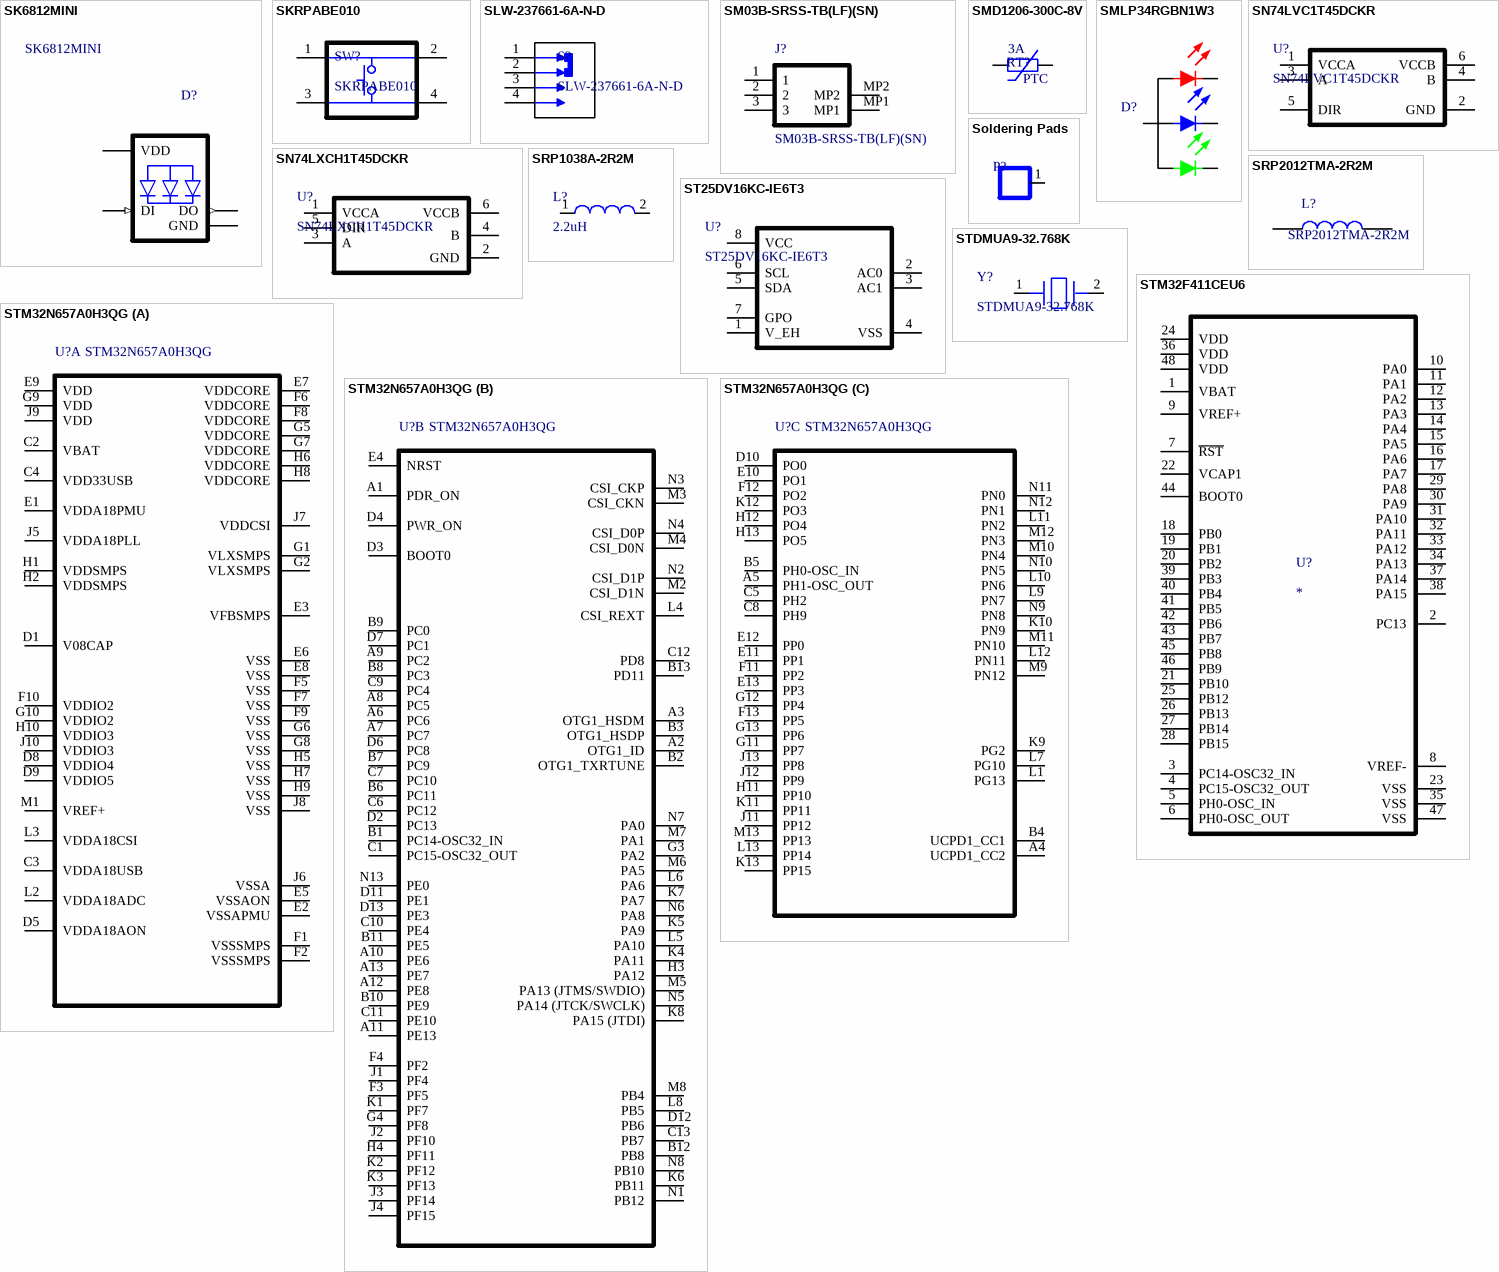
[diagram p12: symbols SK6812MINI to STM32N657A0H3QG]

## SK6812MINI
designator D?
Programmable LED RGB, 3.5mmx3.5mm.; Manufacturer: DONGGUANG OPSCO OPTOELECTRONICS; Manufacturer Part Number: SK6812MINI; Category: LEDs
footprint LED_ADDR_3535
pins: 1 DI (in), 2 VDD (power), 3 DO (out), 4 GND (power)

## SKRPABE010
designator SW?
Switch Tactile N.O. SPST Button J-Bend 0.05A 16VDC 1.57N SMD Automotive T/R; Manufacturer: ALPS; Actuator Length: 711.2µm; Contact Current Rating: 50mA; Contact Resistance: 500mΩ; Electrical Life: 100kcycles; Insulation Resistance: 100MΩ; Max Voltage Rating (DC): 16V; Number of Positions: 1; Supplier: DigiKey; Supplier Part Number: 4809-SKRPABE010CT-ND; Manufacturer Part Number: SKRPABE010; RoHS: Compliant; Category: Tactile Switches; Stock: 83931; Pricing: 1=0.21, 10=0.179, 25=0.1684, 100=0.1511, 250=0.14016, 500=0.13228, 1000=0.12484 (USD); Case/Package: SMD/SMT; Color: Clear; Contact Plating: Silver; Current Rating: 50mA; Depth: 4.6mm; Height: 1.8034mm; Lead Free: Lead Free; Length: 4.191mm; Life (Cycles): 100kcycles; Lifecycle Status: Production; Max Current Rating: 50mA; Max Operating Temperature: 85°C; Min Operating Temperature: -30°C; Mounting Technology: Surface Mount; Operating Force: 1.57N; Orientation: Straight; Radiation Hardening: No; Termination: J-Bend; Throw Configuration: SPST; Voltage Rating (DC): 16V; ComponentLink1URL: https://datasheet.octopart.com:443/SKRPABE010-ALPS-datasheet-182234810.pdf?src-supplier=IHS; ComponentLink1Description: https://datasheet.octopart.com:443/SKRPABE010-ALPS-datasheet-182234810.pdf?src-supplier=IHS; ComponentLink2URL: https://datasheet.octopart.com:443/SKRPABE010-ALPS-datasheet-182235266.pdf?src-supplier=IHS; ComponentLink2Description: https://datasheet.octopart.com:443/SKRPABE010-ALPS-datasheet-182235266.pdf?src-supplier=IHS; ComponentLink3URL: https://datasheet.octopart.com:443/SKRPABE010-ALPS-datasheet-41327040.pdf?src-supplier=Master+Electronics; ComponentLink3Description: https://datasheet.octopart.com:443/SKRPABE010-ALPS-datasheet-41327040.pdf?src-supplier=Master+Electronics; ComponentLink4URL: https://datasheet.octopart.com:443/SKRPABE010-ALPS-datasheet-138899521.pdf?src-supplier=TME; ComponentLink4Description: https://datasheet.octopart.com:443/SKRPABE010-ALPS-datasheet-138899521.pdf?src-supplier=TME; ComponentLink5URL: https://datasheet.octopart.com:443/SKRPABE010-ALPS-datasheet-37145204.pdf?src-supplier=Electro+Sonic; ComponentLink5Description: https://datasheet.octopart.com:443/SKRPABE010-ALPS-datasheet-37145204.pdf?src-supplier=Electro+Sonic
footprint SKRPABE010
pins: 1, 2, 3, 4